# Altium footprint library Ceramic_SMD.PcbLib: 2 footprints
Each footprint in its own frame and in the unit in brackets; x right, y up, seen from the top. Pads: shape width x height; smd on the part's side, far side on the other; paste and mask are expansions set on the pad; w line width, h text height; cw(c..) or ccw(c..) is an arc to the next point about the centre after c.
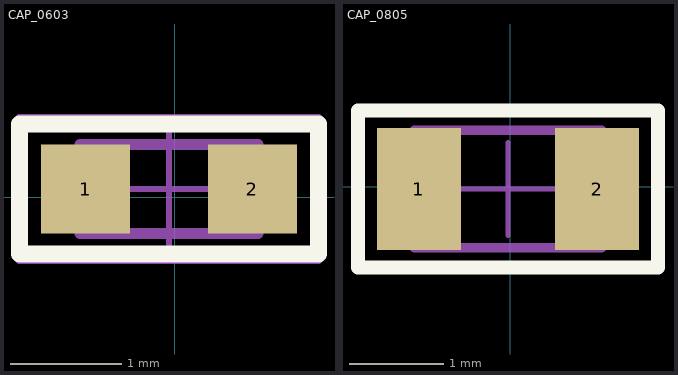
[diagram p0: the footprints below, top view; thin cyan lines are the x and y axes]

## CAP_0603 [mm]
pads (2):
  rect 0.8x0.8 smd: 1(-0.801,0.076) 2(0.699,0.076)
Top Overlay:
  lines w0.152: -1.395,-0.508 1.295,-0.508 1.295,0.66 -1.219,0.66 -1.395,0.66 -1.395,-0.508
Mechanical 13:
  lines w0.1: -0.851,-0.324 -0.851,0.476 0.749,0.476 0.749,-0.324 -0.851,-0.324
Mechanical 15:
  lines w0.05: -0.551,0.076 0.449,0.076 ; -0.051,-0.424 -0.051,0.576 ; -1.401,-0.574 -1.401,0.726 1.299,0.726 1.299,-0.574 -1.401,-0.574
3D body "1.6x0.8x0.8x0.4.stp": height 0.8, standoff 0, extent -0.851,-0.324 0.749,0.476

## CAP_0805 [mm]
pads (2):
  rect 0.9x1.3 smd: 1(-0.975,-0.025) 2(0.925,-0.025)
Top Overlay:
  lines w0.152: -1.626,-0.864 -1.626,0.813 -1.473,0.813 1.575,0.813 1.575,-0.864 -1.626,-0.864
Mechanical 13:
  lines w0.1: -1.025,-0.65 0.975,-0.65 0.975,0.6 -1.025,0.6 -1.025,-0.65
Mechanical 15:
  lines w0.05: -0.525,-0.025 0.475,-0.025 ; -0.025,-0.525 -0.025,0.475 ; -1.625,-0.9 -1.625,0.85 1.575,0.85 1.575,-0.9 -1.625,-0.9
3D body "2x1.25x0.6x0.5.stp": height 0.6, standoff 0, extent -1.025,-0.65 0.975,0.6